# Altium schematic symbol library oscillators.SchLib: 2 symbols
Pins are listed as number, name and electrical type; pins without a type are passive.

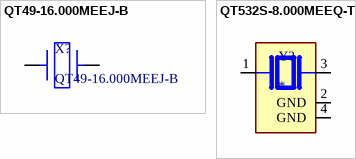
[diagram p0: symbols QT49-16.000MEEJ-B to QT532S-8.000MEEQ-T]

## QT49-16.000MEEJ-B
designator X?
Crystal; 16MHz; THT; 11.5x5x3.68mm; 18pF; Freq.stability: ±10ppm
footprint QT49-16.000MEEJ-B (Crystal; 16MHz; THT; 11.5x5x3.68mm; 18pF; Freq.stability: ±10ppm)
pins: 1, 2

## QT532S-8.000MEEQ-T
designator Y?
8 MHz Â±10ppm Crystal 10pF 80 Ohms 4-SMD, No Lead; MF: QST PRODUCTS LLC; MP: QT532S-8.000MEEQ-T; SnapEDA_Link: https://www.snapeda.com/parts/QT532S-8.000MEEQ-T/QST+PRODUCTS+LLC/view-part/?ref=snap; Package: NON STANDARD-4 QST PRODUCTS LLC; Value: *; Check_prices: https://www.snapeda.com/parts/QT532S-8.000MEEQ-T/QST+PRODUCTS+LLC/view-part/?ref=eda
footprint XTAL_QT532S-8.000MEEQ-T
pins: 1, 2 GND (power), 3 2, 4 GND (power)